# Altium schematic symbol library ACS714.SchLib: 1 symbol
Pins are listed as number, name and electrical type; pins without a type are passive.

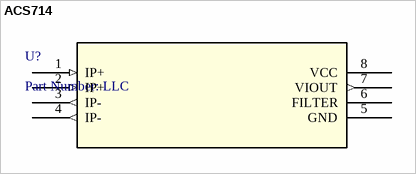
[diagram p0: symbol ACS714]

## ACS714
designator U?, comment Part Number: LLC
No Description Available; Vendor: Allegro Microsystems Inc.; Built_By: EMA_UL_Team; Manufacturer_Part_Number: LLC; Copyright: Copyright (C) 2018 Accelerated Designs. All rights reserved; RefDes: RefDes; Type: DEV; Value: Value
footprint SOIC-8
pins: 1 IP+ (in), 2 IP+ (in), 3 IP- (out), 4 IP- (out), 5 GND (power), 6 FILTER, 7 VIOUT (out), 8 VCC (power)